# Altium footprint library 固定柱.PcbLib: 140 footprints (part 6 of 9)
Each footprint in its own frame and in the unit in brackets; x right, y up, seen from the top. Pads: shape width x height; smd on the part's side, far side on the other; paste and mask are expansions set on the pad; w line width, h text height; cw(c..) or ccw(c..) is an arc to the next point about the centre after c.
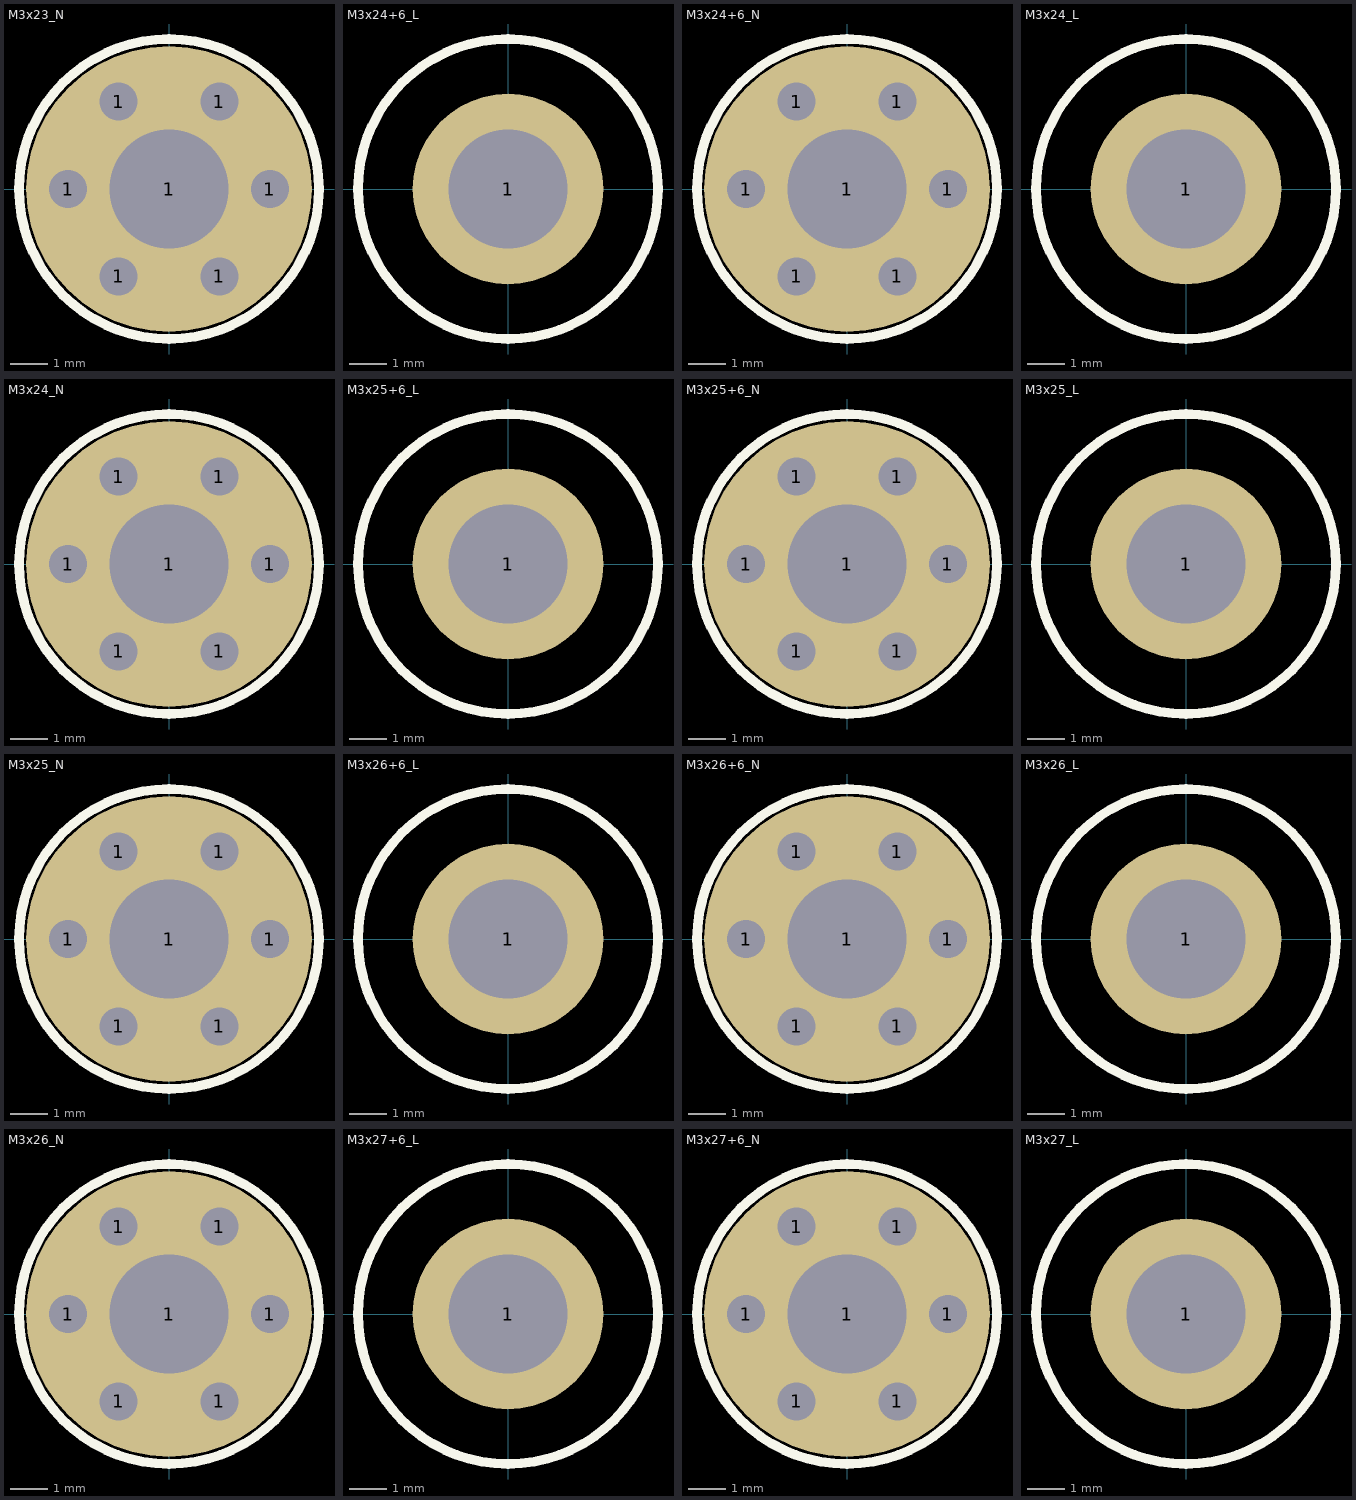
[diagram p5: the footprints below, top view; thin cyan lines are the x and y axes]

## M3x23_N [mil] "M3铜柱，长：23mm"
pads (7):
  round 40 hole 40: 1(-106,0) 1(-53,-91.8) 1(-53,91.8) 1(53,-91.8) 1(53,91.8) 1(106,0)
  round 300 hole 125: 1(0,0)
Top Overlay:
  circle w10: c0,0 r157.48
3D body "M3x23.STEP": height 907.49, standoff 1.96, extent -106.22,-92.52 106.22,92.52

## M3x24+6_L [mil] "M3铜柱，长：24mm，螺纹长：6mm"
pads (1):
  round 200 hole 125: 1(0,0)
Top Overlay:
  circle w10: c0,0 r157.48
3D body "M3x24+6.STEP": height 946.86, standoff -234.25, extent -106.22,-92.52 106.22,92.52

## M3x24+6_N [mil] "M3铜柱，长：24mm，螺纹长：6mm"
pads (7):
  round 40 hole 40: 1(-106,0) 1(-53,-91.8) 1(-53,91.8) 1(53,-91.8) 1(53,91.8) 1(106,0)
  round 300 hole 125: 1(0,0)
Top Overlay:
  circle w10: c0,0 r157.48
3D body "M3x24+6.STEP": height 946.86, standoff -234.25, extent -106.22,-92.52 106.22,92.52

## M3x24_L [mil] "M3铜柱，长：24mm"
pads (1):
  round 200 hole 125: 1(0,0)
Top Overlay:
  circle w10: c0,0 r157.48
3D body "M3x24.STEP": height 946.86, standoff 1.96, extent -106.22,-92.52 106.22,92.52

## M3x24_N [mil] "M3铜柱，长：24mm"
pads (7):
  round 40 hole 40: 1(-106,0) 1(-53,-91.8) 1(-53,91.8) 1(53,-91.8) 1(53,91.8) 1(106,0)
  round 300 hole 125: 1(0,0)
Top Overlay:
  circle w10: c0,0 r157.48
3D body "M3x24.STEP": height 946.86, standoff 1.96, extent -106.22,-92.52 106.22,92.52

## M3x25+6_L [mil] "M3铜柱，长：25mm，螺纹长：6mm"
pads (1):
  round 200 hole 125: 1(0,0)
Top Overlay:
  circle w10: c0,0 r157.48
3D body "M3x25+6.STEP": height 986.23, standoff -234.25, extent -106.22,-92.52 106.22,92.52

## M3x25+6_N [mil] "M3铜柱，长：25mm，螺纹长：6mm"
pads (7):
  round 40 hole 40: 1(-106,0) 1(-53,-91.8) 1(-53,91.8) 1(53,-91.8) 1(53,91.8) 1(106,0)
  round 300 hole 125: 1(0,0)
Top Overlay:
  circle w10: c0,0 r157.48
3D body "M3x25+6.STEP": height 986.23, standoff -234.25, extent -106.22,-92.52 106.22,92.52

## M3x25_L [mil] "M3铜柱，长：25mm"
pads (1):
  round 200 hole 125: 1(0,0)
Top Overlay:
  circle w10: c0,0 r157.48
3D body "M3x25.STEP": height 986.23, standoff 1.96, extent -106.22,-92.52 106.22,92.52

## M3x25_N [mil] "M3铜柱，长：25mm"
pads (7):
  round 40 hole 40: 1(-106,0) 1(-53,-91.8) 1(-53,91.8) 1(53,-91.8) 1(53,91.8) 1(106,0)
  round 300 hole 125: 1(0,0)
Top Overlay:
  circle w10: c0,0 r157.48
3D body "M3x25.STEP": height 986.23, standoff 1.96, extent -106.22,-92.52 106.22,92.52

## M3x26+6_L [mil] "M3铜柱，长：26mm，螺纹长：6mm"
pads (1):
  round 200 hole 125: 1(0,0)
Top Overlay:
  circle w10: c0,0 r157.48
3D body "M3x26+6.STEP": height 1025.6, standoff -234.25, extent -106.22,-92.52 106.22,92.52

## M3x26+6_N [mil] "M3铜柱，长：26mm，螺纹长：6mm"
pads (7):
  round 40 hole 40: 1(-106,0) 1(-53,-91.8) 1(-53,91.8) 1(53,-91.8) 1(53,91.8) 1(106,0)
  round 300 hole 125: 1(0,0)
Top Overlay:
  circle w10: c0,0 r157.48
3D body "M3x26+6.STEP": height 1025.6, standoff -234.25, extent -106.22,-92.52 106.22,92.52

## M3x26_L [mil] "M3铜柱，长：26mm"
pads (1):
  round 200 hole 125: 1(0,0)
Top Overlay:
  circle w10: c0,0 r157.48
3D body "M3x26.STEP": height 1025.6, standoff 1.96, extent -106.22,-92.52 106.22,92.52

## M3x26_N [mil] "M3铜柱，长：26mm"
pads (7):
  round 40 hole 40: 1(-106,0) 1(-53,-91.8) 1(-53,91.8) 1(53,-91.8) 1(53,91.8) 1(106,0)
  round 300 hole 125: 1(0,0)
Top Overlay:
  circle w10: c0,0 r157.48
3D body "M3x26.STEP": height 1025.6, standoff 1.96, extent -106.22,-92.52 106.22,92.52

## M3x27+6_L [mil] "M3铜柱，长：27mm，螺纹长：6mm"
pads (1):
  round 200 hole 125: 1(0,0)
Top Overlay:
  circle w10: c0,0 r157.48
3D body "M3x27+6.STEP": height 1064.97, standoff -234.25, extent -106.22,-92.52 106.22,92.52

## M3x27+6_N [mil] "M3铜柱，长：27mm，螺纹长：6mm"
pads (7):
  round 40 hole 40: 1(-106,0) 1(-53,-91.8) 1(-53,91.8) 1(53,-91.8) 1(53,91.8) 1(106,0)
  round 300 hole 125: 1(0,0)
Top Overlay:
  circle w10: c0,0 r157.48
3D body "M3x27+6.STEP": height 1064.97, standoff -234.25, extent -106.22,-92.52 106.22,92.52

## M3x27_L [mil] "M3铜柱，长：27mm"
pads (1):
  round 200 hole 125: 1(0,0)
Top Overlay:
  circle w10: c0,0 r157.48
3D body "M3x27.STEP": height 1064.97, standoff 1.96, extent -106.22,-92.52 106.22,92.52